# Altium integrated library TL431BQDBZR.IntLib: 1 symbol
Pins are listed as number, name and electrical type; pins without a type are passive.

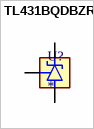
[diagram p0: symbol TL431BQDBZR]

## TL431BQDBZR
designator U?
MP: TL431BQDBZR; Package: None; Price: None; Value: *; Availability: Unavailable
footprint SOT95P237X112-3N
pins: 1 CATHODE, 2 REF, 3 ANODE